# Altium schematic symbol library 14MV1.SCHLIB: 27 symbols
Pins are listed as number, name and electrical type; pins without a type are passive.

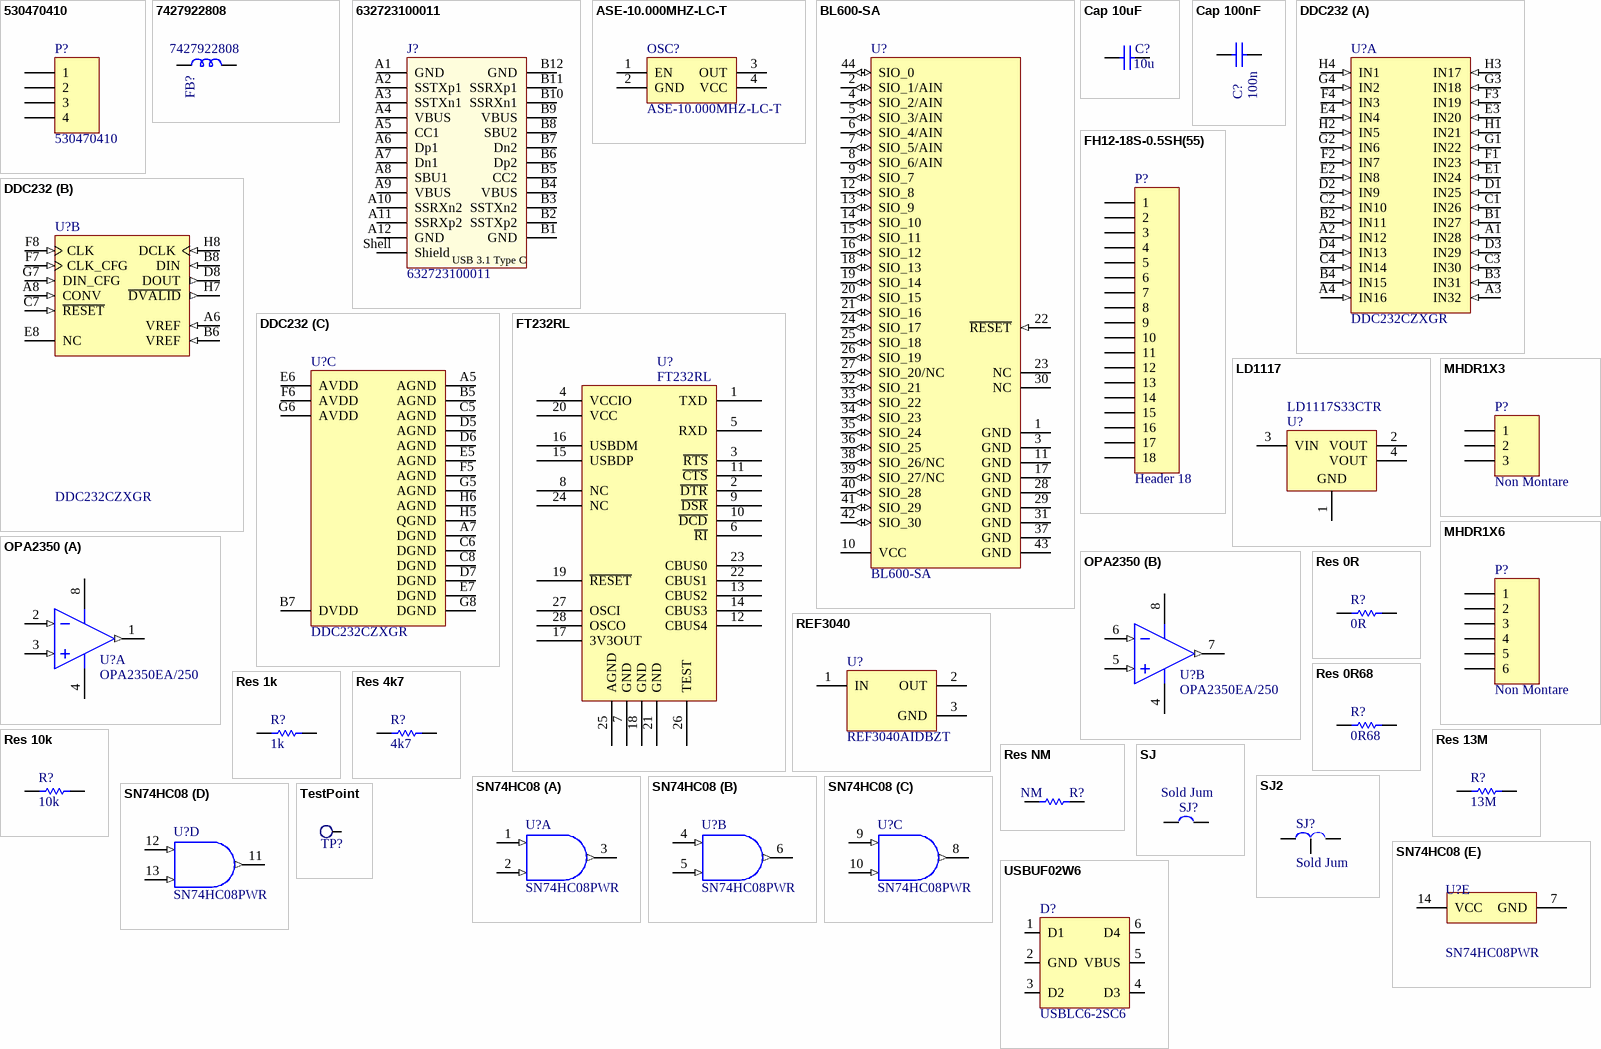
[diagram p0: symbols 530470410 to USBUF02W6]

## 530470410
designator P?
Header, 4-Pin; LatestRevisionDate: 17-Jul-2002; LatestRevisionNote: Re-released for DXP Platform.; Publisher: Altium Limited; Supplier 1: Digi-Key; Supplier 2: Farnell; Supplier Part Number 1: WM1733-ND; Supplier Part Number 2: 9733060
footprint MHDR1X4 (Connector; Header; 4 Position)
signal-integrity model Connector
footprint MOLEX_4_V
pins: 1, 2, 3, 4

## 7427922808
designator FB?
Ferrite bead; Supplier 1: Digi-Key; Supplier Part Number 1: 732-6114-1-ND; Supplier 2: Farnell; Supplier Part Number 2: 2467183
footprint 0805
footprint 0603
pins: 1, 2

## 632723100011
designator J?
USB 3.1 Type C Receptacle Horizontal THR WR-COM; Interface Type: Type C; Sub-Family: USB 3.1; ComponentLink1Description: Manufacturer; ComponentLink1URL: http://www.we-online.de; ComponentLink2Description: Datasheet; ComponentLink2URL: http://katalog.we-online.de/em/datasheet/632723x00011.pdf; Part Number: 632723100011; Published Date: April 2017; Publisher: Wurth Elektronik; Gender: Receptacle; Type: Horizontal; Construction: THR; Supplier 1: Digi-Key; Supplier 2: Farnell; Supplier Part Number 1: 732-9617-1-ND; Supplier Part Number 2: 2984360
footprint 632723100011
pins: A1 GND, A2 SSTXp1, A3 SSTXn1, A4 VBUS, A5 CC1, A6 Dp1, A7 Dn1, A8 SBU1, A9 VBUS, A10 SSRXn2, A11 SSRXp2, A12 GND, B1 GND, B2 SSTXp2, B3 SSTXn2, B4 VBUS, B5 CC2, B6 Dp2, B7 Dn2, B8 SBU2, B9 VBUS, B10 SSRXn1, B11 SSRXp1, B12 GND, Shell Shield
text: USB 3.1 Type C

## ASE-10.000MHZ-LC-T
designator OSC?
Oscillator 10 MHz; Supplier 1: Digi-Key; Supplier Part Number 1: 535-9559-1-ND; Supplier 2: Mouser; Supplier Part Number 2: 815-ASE10.000MHZLCT
footprint XTAL_SMD3225
pins: 1 EN, 2 GND, 3 OUT, 4 VCC

## BL600-SA
designator U?
Single Mode Bluetooth Low Energy (BLE) Module Integrated Antenna, 1.8 to 3.6 V, -25 to 75 degC, 44-Pin SMD, RoHS, Tray; Manufacturer: Laird; Manufacturer: Laird Wireless; Bluetooth Version: Bluetooth4.0; Data Rate: 1Mbps; Supply Voltage Max: 3.6V; Supply Voltage Min: 1.8V; SVHC: NoSVHC(17-Dec-2014); Product Range: BL600Series; Receive Sensitivity: -91dBm; Signal Range Max: 100m; Bluetooth Class: Class2; Package Reference: BL600-SA; Datasheet Version: Rev. 3.0, 04/2015; Operating Temperature Max: 75°C; Operating Temperature Min: -25°C; Datasheet URL: http://cdn.lairdtech.com/home/brandworld/files/BL600%20Hardware%20Integration%20Guide.pdf; Package Description: 44-Pin Surface Mount Device, Body 19 x 12.5 mm, Pitch 0.8 mm, Height 3.27 mm; Manufacturer URL: https://www.lairdtech.com/; Mounting Technology: SurfaceMount; Manufacturer Part Number: BL600-SA; Supplier 1: Digi-Key; Supplier 2: Farnell; Supplier Part Number 1: BL600-SA-ND; Supplier Part Number 2: 2321469
footprint LIRD-BL600-SA_V (SMD, 44-Leads, Body 19x12.5mm, Pitch 0.8mm)
pins: 1 GND (power), 2 SIO_1/AIN (io) "DIO/AIN", 3 GND (power), 4 SIO_2/AIN (io) "DIO/AIN", 5 SIO_3/AIN (io) "DIO/AIN", 6 SIO_4/AIN (io) "DIO/AIN", 7 SIO_5/AIN (io) "DIO/AIN", 8 SIO_6/AIN (io) "DIO/AIN", 9 SIO_7 (io) "DIO", 10 VCC (power), 11 GND (power), 12 SIO_8 (io) "DIO/I2C SDA", 13 SIO_9 (io) "DIO/I2C SCL", 14 SIO_10 (io) "DIO/SPI MOSI", 15 SIO_11 (io) "DIO/SPI MISO", 16 SIO_12 (io) "SPI CLK", 17 GND (power), 18 SIO_13 (io) "DIO", 19 SIO_14 (io) "DIO", 20 SIO_15 (io) "DIO", 21 SIO_16 (io) "DIO", 22 ~{RESET} (in), 23 NC, 24 SIO_17 (io) "DIO", 25 SIO_18 (io) "DIO", 26 SIO_19 (io) "DIO", 27 SIO_20/NC (io) "NC", 28 GND (power), 29 GND (power), 30 NC, 31 GND (power), 32 SIO_21 (io) "DIO/UART TX", 33 SIO_22 (io) "DIO/UART RX", 34 SIO_23 (io) "DIO/UART RTS", 35 SIO_24 (io) "DIO/UART CTS", 36 SIO_25 (io) "DIO", 37 GND (power), 38 SIO_26/NC (io) "NC", 39 SIO_27/NC (io) "NC", 40 SIO_28 (io) "nAutoRUN", 41 SIO_29 (io) "DIO", 42 SIO_30 (io) "DIO", 43 GND (power), 44 SIO_0 (io) "DIO"

## Cap 10uF
designator C?, comment 10u
Capacitor MLCC 25V 10%; Published: 8-Jun-2000; LatestRevisionDate: 17-Jul-2002; LatestRevisionNote: Re-released for DXP Platform.; Publisher: Altium Limited
footprint RAD-0.3 (Capacitor; 2 Leads)
footprint CAPR2.54-5.1x3.2 (Capacitor, Ceramic, Thru-Hole, Dipped Radial; Body 5.1 x 3.2 mm (WxT) Pin Spacing 2.54 mm (typ))
footprint CAPR5.08-7.8x3.2 (Capacitor, Ceramic, Thru-Hole, Dipped Radial; Body 7.8 x 3.2 mm (WxT) Pin Spacing 5.08 mm (typ))
simulation model CAP (Capacitor)
signal-integrity model Cap
footprint Model Name (Model Description)
footprint CC1608-0603
footprint 0402
footprint 0805
footprint 0603
pins: 1, 2

## Cap 100nF
designator C?, comment 100n
Capacitor X7R 50V 10%; Published: 8-Jun-2000; LatestRevisionDate: 17-Jul-2002; LatestRevisionNote: Re-released for DXP Platform.; Publisher: Altium Limited
footprint RAD-0.3 (Capacitor; 2 Leads)
footprint CAPR2.54-5.1x3.2 (Capacitor, Ceramic, Thru-Hole, Dipped Radial; Body 5.1 x 3.2 mm (WxT) Pin Spacing 2.54 mm (typ))
footprint CAPR5.08-7.8x3.2 (Capacitor, Ceramic, Thru-Hole, Dipped Radial; Body 7.8 x 3.2 mm (WxT) Pin Spacing 5.08 mm (typ))
simulation model CAP (Capacitor)
signal-integrity model Cap
footprint Model Name (Model Description)
footprint CC1608-0603
footprint 0402
footprint 0805
footprint 0603
pins: 1, 2

## DDC232
designator U?, comment DDC232CZXGR
32 Channel Current-Input 20-Bit ADC, 0 to 70 degC, 64-pin BGA (ZXG64), Green (RoHS & no Sb/Br); Manufacturer: Texas Instruments; Resolution(Bits): 20; Analog Voltage AV/DD(Max)(V): 5.25; Digital Supply(Max)(V): 3.6; Architecture: Delta-Sigma; Digital Supply(Min)(V): 2.7; Sample Rate (max)(SPS): 3.125k; # Input Channels: 32; SubFamily: Low Power, 8-Bit, Dual 1.5 GSPS or Single 3.0 GSPS A/D Converter; Analog Voltage AV/DD(Min)(V): 4.75; ComponentLink3URL: http://www.ti.com/litv/pdf/mpbg581; ComponentLink1URL: http://www.ti.com/; ComponentLink2Description: Datasheet; PackageDescription: 64-Pin Plastic Ball Grid Array, Body 8 x 8 mm, Pitch 0.8 mm; ComponentLink2URL: http://www.ti.com/general/docs/lit/getliterature.tsp?genericPartNumber=DDC232&fileType=pdf; PartNumber: DDC232CZXGR; Eco-Plan: Green (RoHS & no Sb/Br); Mounting Technology: Surface Mount; PackageVersion: 4206838/A, 02/2005; PackageReference: ZXG64; ComponentLink1Description: Manufacturer URL; DatasheetVersion: SBAS331D; ComponentLink3Description: Package Specification; Manufacturer Part Number: DDC232CZXGR; Supplier 1: Digi-Key; Supplier Part Number 1: 296-23858-1-ND
footprint TI-ZXG64 (BGA, 64-Balls, Body 8x8mm, Pitch 0.8mm)
part A pins: A1 IN28 (in) "Analog Inputs for Channels 1 to 32", A2 IN12 (in) "Analog Inputs for Channels 1 to 32", A3 IN32 (in) "Analog Inputs for Channels 1 to 32", A4 IN16 (in) "Analog Inputs for Channels 1 to 32", B1 IN27 (in) "Analog Inputs for Channels 1 to 32", B2 IN11 (in) "Analog Inputs for Channels 1 to 32", B3 IN31 (in) "Analog Inputs for Channels 1 to 32", B4 IN15 (in) "Analog Inputs for Channels 1 to 32", C1 IN26 (in) "Analog Inputs for Channels 1 to 32", C2 IN10 (in) "Analog Inputs for Channels 1 to 32", C3 IN30 (in) "Analog Inputs for Channels 1 to 32", C4 IN14 (in) "Analog Inputs for Channels 1 to 32", D1 IN25 (in) "Analog Inputs for Channels 1 to 32", D2 IN9 (in) "Analog Inputs for Channels 1 to 32", D3 IN29 (in) "Analog Inputs for Channels 1 to 32", D4 IN13 (in) "Analog Inputs for Channels 1 to 32", E1 IN24 (in) "Analog Inputs for Channels 1 to 32", E2 IN8 (in) "Analog Inputs for Channels 1 to 32", E3 IN20 (in) "Analog Inputs for Channels 1 to 32", E4 IN4 (in) "Analog Inputs for Channels 1 to 32", F1 IN23 (in) "Analog Inputs for Channels 1 to 32", F2 IN7 (in) "Analog Inputs for Channels 1 to 32", F3 IN19 (in) "Analog Inputs for Channels 1 to 32", F4 IN3 (in) "Analog Inputs for Channels 1 to 32", G1 IN22 (in) "Analog Inputs for Channels 1 to 32", G2 IN6 (in) "Analog Inputs for Channels 1 to 32", G3 IN18 (in) "Analog Inputs for Channels 1 to 32", G4 IN2 (in) "Analog Inputs for Channels 1 to 32", H1 IN21 (in) "Analog Inputs for Channels 1 to 32", H2 IN5 (in) "Analog Inputs for Channels 1 to 32", H3 IN17 (in) "Analog Inputs for Channels 1 to 32", H4 IN1 (in) "Analog Inputs for Channels 1 to 32"
part B pins: A6 VREF (in) "External Voltage Reference Input, +4.096V Nominal", A8 CONV (in) "Conversion Control Input; 0 = Integrate on Side B, 1 = Integrate on Side A", B6 VREF (in) "External Voltage Reference Input, +4.096V Nominal", B8 DIN (in) "Serial Data Input", C7 ~{RESET} (in) "Digital Reset, Active Low", D8 DOUT (out) "Serial Data Output", E8 NC "Do not connect; must be left floating.", F7 CLK_CFG (in) "Configuration Register Clock Input", F8 CLK (in) "Master Clock Input", G7 DIN_CFG (in) "Configuration Register Data Input", H7 ~{DVALID} (out) "Data Valid Output, Active Low", H8 DCLK (in) "Serial Data Clock Input"
part C pins: A5 AGND (power) "Analog Ground", A7 DGND (power) "Digital Ground", B5 AGND (power) "Analog Ground", B7 DVDD (power) "Digital Power Supply, 3.3V Nominal", C5 AGND (power) "Analog Ground", C6 DGND (power) "Digital Ground", C8 DGND (power) "Digital Ground", D5 AGND (power) "Analog Ground", D6 AGND (power) "Analog Ground", D7 DGND (power) "Digital Ground", E5 AGND (power) "Analog Ground", E6 AVDD (power) "Analog Power Supply, +5V Nominal", E7 DGND (power) "Digital Ground", F5 AGND (power) "Analog Ground", F6 AVDD (power) "Analog Power Supply, +5V Nominal", G5 AGND (power) "Analog Ground", G6 AVDD (power) "Analog Power Supply, +5V Nominal", G8 DGND (power) "Digital Ground", H5 QGND (power) "Quiet Analog Ground", H6 AGND (power) "Analog Ground"

## FH12-18S-0.5SH(55)
designator P?, comment Header 18
Header, 18-Pin; LatestRevisionDate: 17-Jul-2002; LatestRevisionNote: Re-released for DXP Platform.; Publisher: Altium Limited; Supplier 1: Digi-Key; Supplier 2: RSComponents; Supplier Part Number 1: HFJ118CT-ND; Supplier Part Number 2: 7388824
footprint HDR1X18 (Connector; Header; 18 Position)
signal-integrity model Connector
footprint FH12-18S-0.5SH(55)
pins: 1, 2, 3, 4, 5, 6, 7, 8, 9, 10, 11, 12, 13, 14, 15, 16, 17, 18

## FT232RL
designator U?
USB  to  serial  UART   interface; Supplier 1: Digi-Key; Supplier Part Number 1: 768-1007-1-ND; Supplier 2: Farnell; Supplier Part Number 2: 1146032
footprint TSSOP28-W
pins: 1 TXD, 2 ~{DTR}, 3 ~{RTS}, 4 VCCIO, 5 RXD, 6 ~{RI}, 7 GND, 8 NC, 9 ~{DSR}, 10 ~{DCD}, 11 ~{CTS}, 12 CBUS4, 13 CBUS2, 14 CBUS3, 15 USBDP, 16 USBDM, 17 3V3OUT, 18 GND, 19 ~{RESET}, 20 VCC, 21 GND, 22 CBUS1, 23 CBUS0, 24 NC, 25 AGND, 26 TEST, 27 OSCI, 28 OSCO

## LD1117
designator U?, comment LD1117S33CTR
Fixed Low Drop Positive Voltage Regulator, 3.3V, 4-Pin SOT-223, Tape and Reel; Manufacturer: STMicroelectronics; ComponentLink1URL: http://www.st.com; PackageVersion: 2010; ComponentLink1Description: Manufacturer URL; DatasheetVersion: 1/11/2011; ComponentLink2URL: http://www.st.com/internet/com/TECHNICAL_RESOURCES/TECHNICAL_LITERATURE/DATASHEET/CD00000544.pdf; PackageReference: SOT-223; ComponentLink2Description: Datasheet; PackageDescription: 4-Pin SOT-223 Package, 6.5 x 3.5 mm Body, 2.3 mm Pitch, 7 mm Lead Span; Manufacturer Part Number: LD1117S33CTR; Supplier 1: Digi-Key; Supplier 2: Farnell; Supplier Part Number 1: 497-1241-1-ND; Supplier Part Number 2: 1467779
footprint SOT-223_N (SOT223, 4-Leads, Body 6.5x3.5mm, Pitch 2.3mm, Lead Span 7mm, IPC Medium Density)
footprint SOT-223_M (SOT223, 4-Leads, Body 6.5x3.5mm, Pitch 2.3mm, Lead Span 7mm, IPC Low Density)
footprint SOT-223_L (SOT223, 4-Leads, Body 6.5x3.5mm, Pitch 2.3mm, Lead Span 7mm, IPC High Density)
pins: 1 GND (power), 2 VOUT (power), 3 VIN (power), 4 VOUT (power)

## MHDR1X3
designator P?, comment Non Montare
Header, 3-Pin; LatestRevisionDate: 17-Jul-2002; LatestRevisionNote: Re-released for DXP Platform.; Publisher: Altium Limited
footprint MHDR1X3 (Connector; Header; 3 Position)
signal-integrity model Connector
pins: 1, 2, 3

## MHDR1X6
designator P?, comment Non Montare
Header, 6-Pin; LatestRevisionDate: 17-Jul-2002; LatestRevisionNote: Re-released for DXP Platform.; Publisher: Altium Limited
footprint MHDR1X6 (Connector; Header; 6 Position)
signal-integrity model Connector
pins: 1, 2, 3, 4, 5, 6

## OPA2350
designator U?, comment OPA2350EA/250
High-Speed, Single-Supply, Rail-to-Rail Operational Amplifier MicroAmplifier(TM) Series, 2.7 to 5.5 V, -40 to 85 degC, 8-pin SOP (DGK8), Green (RoHS & no Sb/Br); Manufacturer: Texas Instruments; Number of Channels: 2; Vn at 1kHz(Typ)(nV/rtHz): 18; Offset Drift(Typ)(uV/C): 4; Slew Rate(Typ)(V/us): 22; Iq per channel(Max)(mA): 8.5; CMRR(Min)(dB): 74; Total Supply Voltage(Max)(+5V is 5, +/-5V is 10): 5.5; Vio (25C)(Max)(mV): 1; Total Supply Voltage(Min)(+5V is 5, +/-5V is 10): 2.7; IIB(Max)(pA): 10; Sub Family: Low Input Bias Current Amp (<=10pA), Low Offset Voltage Amplifier (<=500uV), Low Supply Voltage Amplifier (<=2.7V), Precision Amplifier; ComponentLink3URL: http://www.ti.com/litv/pdf/mpds028d; ComponentLink2URL: http://www.ti.com/general/docs/lit/getliterature.tsp?genericPartNumber=OPA2350&fileType=pdf; ComponentLink3Description: Package Specification; Eco-Plan: Green (RoHS & no Sb/Br); ComponentLink2Description: Datasheet; PackageVersion: 4073329/E, 05/2006; PackageDescription: 8-Pin Thin Small Outline, Body 3 x 3 mm, Pitch 0.65 mm; PackageReference: DGK0008A; Mounting Technology: Surface Mount; ComponentLink1Description: Manufacturer URL; PartNumber: OPA2350EA/250; Code_JEDEC: MO-187; ComponentLink1URL: http://www.ti.com/; DatasheetVersion: SBOS099C; Manufacturer Part Number: OPA2350EA/250; Supplier 1: Digi-Key; Supplier 2: Farnell; Supplier Part Number 1: OPA2350EACT-ND; Supplier Part Number 2: 3117460
footprint DGK0008A_N (TSOP, 8-Leads, Body 3.1x3.1mm, Pitch 0.65mm, IPC Medium Density)
footprint DGK0008A_L (TSOP, 8-Leads, Body 3.1x3.1mm, Pitch 0.65mm, IPC High Density)
footprint DGK0008A_M (TSOP, 8-Leads, Body 3.1x3.1mm, Pitch 0.65mm, IPC Low Density)
pins on every part: 4 V- (power), 8 V+ (power)
part A pins: 1 OUT A (out), 2 IN A- (in), 3 IN A+ (in)
part B pins: 5 IN B+ (in), 6 IN B- (in), 7 OUT B (out)

## REF3040
designator U?, comment REF3040AIDBZT
4.096 V, 50 ppm / degC, 50 uA Series (Bandgap) Voltage Reference, -40 to 125 degC, 3-pin SOT-23 (DBZ), Green (RoHS & no Sb/Br); Manufacturer: Texas Instruments; Temp Coeff(Max)(ppm/ degree C): 50; SubFamily: Series Voltage Reference; Temp Coeff(Typ)(ppm/ degree C): 20; Initial Accuracy @ 25/deg C(%): 0.2; VI(Max)(V): 5.5; VO(V): 4.096; VI(Min)(V): 4.097; Rating: Catalog; PartNumber: REF3040AIDBZT; ComponentLink3Description: Package Specification; Iq(Max)(uA): 50; PackageVersion: 4203227/B; DatasheetVersion: SBVS032F; PackageReference: DBZ0003A; ComponentLink1URL: http://www.ti.com/; PackageDescription: 3-Pin Plastic Small Outline, Body 2.92 x 1.3 mm, Pitch 0.95 mm; Mounting Technology: Surface Mount; Eco-Plan: Green (RoHS & no Sb/Br); ComponentLink2URL: http://www.ti.com/general/docs/lit/getliterature.tsp?genericPartNumber=REF3040&fileType=pdf; Code_JEDEC: TO-236; ComponentLink1Description: Manufacturer URL; ComponentLink3URL: http://www.ti.com/litv/pdf/mpds108a; ComponentLink2Description: Datasheet; Manufacturer Part Number: REF3040AIDBZT; Supplier 1: Digi-Key; Supplier 2: Farnell; Supplier Part Number 1: REF3040AIDBZTCT-ND; Supplier Part Number 2: 3124532
footprint DBZ0003A_M (SOT23, 3-Leads, Body 3.04x1.4mm, Pitch 0.95mm, IPC Low Density)
footprint DBZ0003A_L (SOT23, 3-Leads, Body 3.04x1.4mm, Pitch 0.95mm, IPC High Density)
footprint DBZ0003A_N (SOT23, 3-Leads, Body 3.04x1.4mm, Pitch 0.95mm, IPC Medium Density)
pins: 1 IN (power), 2 OUT (power), 3 GND (power)

## Res 0R
designator R?, comment 0R
Resistor 0.1W 1%; Published: 8-Jun-2000; Publisher: Altium Limited; Value: 0R; LatestRevisionDate: 17-Jul-2002; LatestRevisionNote: Re-released for DXP Platform.; PackageReference: AXIAL-0.3; PackageDescription: Axial Device, Thru-Hole; 2 Leads; 0.3 in Pin Spacing
footprint AXIAL-0.3 (Axial Device, Thru-Hole; 2 Leads; 0.3 in Pin Spacing)
simulation model RESISTOR (Resistor)
signal-integrity model Res
footprint 0402
footprint 0603
pins: 1, 2

## Res 0R68
designator R?, comment 0R68
Resistor 0.1W 1%; Published: 8-Jun-2000; Publisher: Altium Limited; Value: 0R68; LatestRevisionDate: 17-Jul-2002; LatestRevisionNote: Re-released for DXP Platform.; PackageReference: AXIAL-0.3; PackageDescription: Axial Device, Thru-Hole; 2 Leads; 0.3 in Pin Spacing
footprint AXIAL-0.3 (Axial Device, Thru-Hole; 2 Leads; 0.3 in Pin Spacing)
simulation model RESISTOR (Resistor)
signal-integrity model Res
footprint 0402
footprint 0603
pins: 1, 2

## Res 1k
designator R?, comment 1k
Resistor 0.1W 1%; Published: 8-Jun-2000; Publisher: Altium Limited; Value: 1k; LatestRevisionDate: 17-Jul-2002; LatestRevisionNote: Re-released for DXP Platform.; PackageReference: AXIAL-0.3; PackageDescription: Axial Device, Thru-Hole; 2 Leads; 0.3 in Pin Spacing
footprint AXIAL-0.3 (Axial Device, Thru-Hole; 2 Leads; 0.3 in Pin Spacing)
simulation model RESISTOR (Resistor)
signal-integrity model Res
footprint 0402
footprint 0603
pins: 1, 2

## Res 4k7
designator R?, comment 4k7
Resistor 0.1W 1%; Published: 8-Jun-2000; Publisher: Altium Limited; Value: 4k7; LatestRevisionDate: 17-Jul-2002; LatestRevisionNote: Re-released for DXP Platform.; PackageReference: AXIAL-0.3; PackageDescription: Axial Device, Thru-Hole; 2 Leads; 0.3 in Pin Spacing
footprint AXIAL-0.3 (Axial Device, Thru-Hole; 2 Leads; 0.3 in Pin Spacing)
simulation model RESISTOR (Resistor)
signal-integrity model Res
footprint 0402
footprint 0603
pins: 1, 2

## Res 10k
designator R?, comment 10k
Resistor 0.1W 1%; Published: 8-Jun-2000; Publisher: Altium Limited; Value: 10k; LatestRevisionDate: 17-Jul-2002; LatestRevisionNote: Re-released for DXP Platform.; PackageReference: AXIAL-0.3; PackageDescription: Axial Device, Thru-Hole; 2 Leads; 0.3 in Pin Spacing
footprint AXIAL-0.3 (Axial Device, Thru-Hole; 2 Leads; 0.3 in Pin Spacing)
simulation model RESISTOR (Resistor)
signal-integrity model Res
footprint 0402
footprint 0603
pins: 1, 2

## Res 13M
designator R?, comment 13M
Resistor 0.1W 1%; Published: 8-Jun-2000; Publisher: Altium Limited; Value: 13M; LatestRevisionDate: 17-Jul-2002; LatestRevisionNote: Re-released for DXP Platform.; PackageReference: AXIAL-0.3; PackageDescription: Axial Device, Thru-Hole; 2 Leads; 0.3 in Pin Spacing
footprint AXIAL-0.3 (Axial Device, Thru-Hole; 2 Leads; 0.3 in Pin Spacing)
simulation model RESISTOR (Resistor)
signal-integrity model Res
footprint 0402
footprint 0603
pins: 1, 2

## Res NM
designator R?, comment NM
Resistor 0.1W 1%; Fitted: NO; Published: 8-Jun-2000; Revision: July-2002: Re-released for DXP Platform.; Publisher: Altium Limited; Value: NM
footprint AXIAL-0.3 (Resistor; 2 Leads)
simulation model RESISTOR (Resistor)
signal-integrity model Res
footprint 0603R
footprint CC1608-0603
footprint 0402
footprint 0603
pins: 1, 2
1 alternate drawing of the same symbol

## SJ
designator SJ?, comment Sold Jum
Solder Jumper
footprint Solder_j
pins: 1, 2

## SJ2
designator SJ?, comment Sold Jum
Double solder jumper
footprint Solder_j2
pins: 1, 2, 3

## SN74HC08
designator U?, comment SN74HC08PWR
Quadruple 2-Input Positive-AND Gates, PW0014A, LARGE T&R; Manufacturer: Texas Instruments; F @ Nom Voltage(Max)(Mhz): 70; Schmitt Trigger: No; Rating: Catalog; Input Type: CMOS; Voltage(Nom)(V): 5; VCC(Min)(V): 2; tpd @ Nom Voltage(Max)(ns): 28; Bits(#): 4; Technology Family: HC; VCC(Max)(V): 6; ICC @ Nom Voltage(Max)(mA): 0.02; Output Type: CMOS; DatasheetVersion: SCLS081F; Generic Part Number: SN74HC08; PackageReference: PW0014A; Operating Temperature Range(C): -40 to 85; Manufacturer Part Number: SN74HC08PWR; Supplier 1: Digi-Key; Supplier 2: Farnell; Supplier Part Number 1: 296-8210-1-ND; Supplier Part Number 2: 3006560
footprint PW0014A_M (SOP, 14-Leads, Body 5.1x4.5mm, Pitch 0.65mm, IPC Low Density)
footprint PW0014A_L (SOP, 14-Leads, Body 5.1x4.5mm, Pitch 0.65mm, IPC High Density)
footprint PW0014A_N (SOP, 14-Leads, Body 5.1x4.5mm, Pitch 0.65mm, IPC Medium Density)
part A pins: 1 1A (in), 2 1B (in), 3 1Y (out)
part B pins: 4 2A (in), 5 2B (in), 6 2Y (out)
part C pins: 8 3Y (out), 9 3A (in), 10 3B (in)
part D pins: 11 4Y (out), 12 4A (in), 13 4B (in)
part E pins: 7 GND (power), 14 VCC (power)

## TestPoint
designator TP?  (value not drawn)
SMD TestPoint
footprint PIN
footprint PIAZZOLA
pins: 1

## USBUF02W6
designator D?, comment USBLC6-2SC6
EMI filter and line termination for USB upstream ports; Supplier 1: Digi-Key; Supplier Part Number 1: 497-5235-1-ND; Supplier 2: Farnell; Supplier Part Number 2: 1269406
footprint SOT23-6
footprint SOT-666
pins: 1 D1, 2 GND, 3 D2, 4 D3, 5 VBUS, 6 D4